# Altium footprint library LimeMicroAltiumLib.PcbLib: 876 footprints (part 25 of 57)
Each footprint in its own frame and in the unit in brackets; x right, y up, seen from the top. Pads: shape width x height; smd on the part's side, far side on the other; paste and mask are expansions set on the pad; w line width, h text height; cw(c..) or ccw(c..) is an arc to the next point about the centre after c.
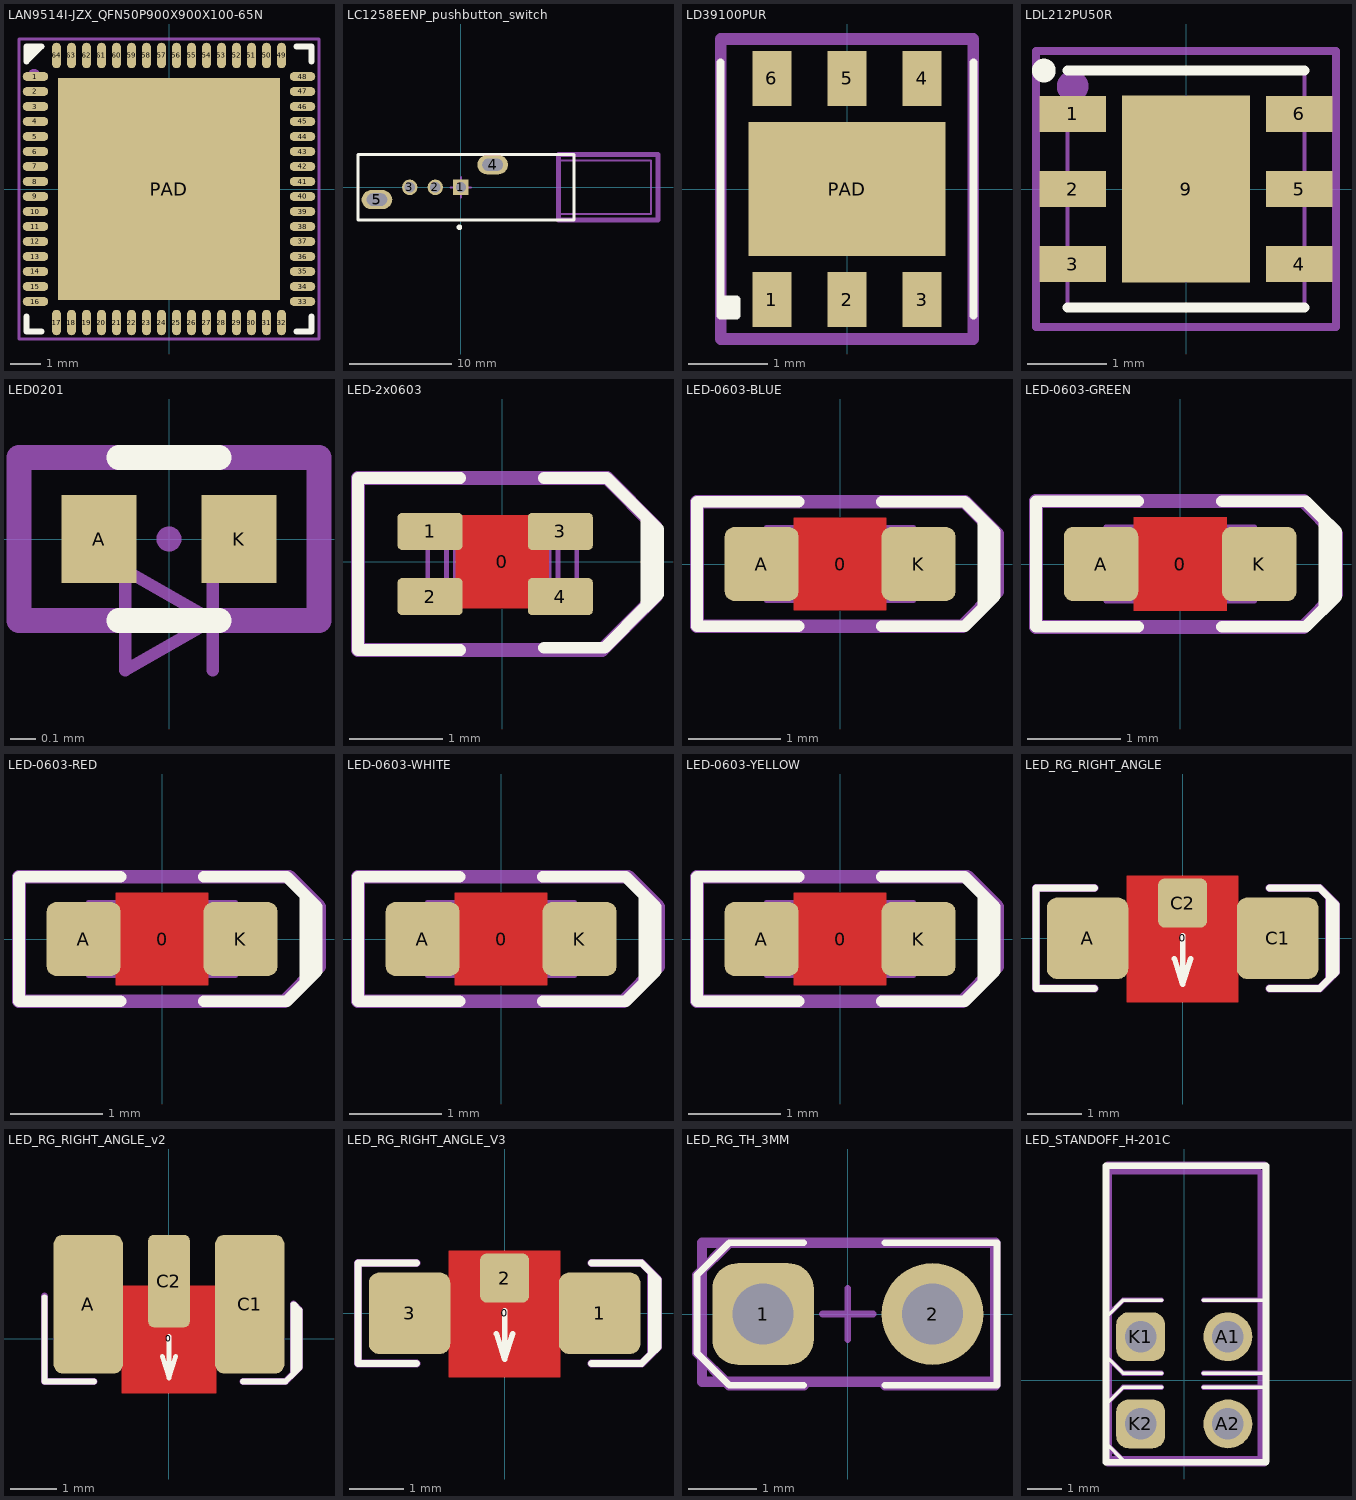
[diagram p24: the footprints below, top view; thin cyan lines are the x and y axes]

## LAN9514I-JZX_QFN50P900X900X100-65N [mm]
pads (65):
  oval 0.85x0.3 smd mask+0.05: 1(-4.45,3.75) 2(-4.45,3.25) 3(-4.45,2.75) 4(-4.45,2.25) 5(-4.45,1.75) 6(-4.45,1.25) 7(-4.45,0.75) 8(-4.45,0.25) 9(-4.45,-0.25) 10(-4.45,-0.75) 11(-4.45,-1.25) 12(-4.45,-1.75) 13(-4.45,-2.25) 14(-4.45,-2.75) 15(-4.45,-3.25) 16(-4.45,-3.75) 33(4.45,-3.75) 34(4.45,-3.25) 35(4.45,-2.75) 36(4.45,-2.25) 37(4.45,-1.75) 38(4.45,-1.25) 39(4.45,-0.75) 40(4.45,-0.25) 41(4.45,0.25) 42(4.45,0.75) 43(4.45,1.25) 44(4.45,1.75) 45(4.45,2.25) 46(4.45,2.75) 47(4.45,3.25) 48(4.45,3.75)
  oval 0.3x0.85 smd mask+0.05: 17(-3.75,-4.45) 18(-3.25,-4.45) 19(-2.75,-4.45) 20(-2.25,-4.45) 21(-1.75,-4.45) 22(-1.25,-4.45) 23(-0.75,-4.45) 24(-0.25,-4.45) 25(0.25,-4.45) 26(0.75,-4.45) 27(1.25,-4.45) 28(1.75,-4.45) 29(2.25,-4.45) 30(2.75,-4.45) 31(3.25,-4.45) 32(3.75,-4.45) 49(3.75,4.45) 50(3.25,4.45) 51(2.75,4.45) 52(2.25,4.45) 53(1.75,4.45) 54(1.25,4.45) 55(0.75,4.45) 56(0.25,4.45) 57(-0.25,4.45) 58(-0.75,4.45) 59(-1.25,4.45) 60(-1.75,4.45) 61(-2.25,4.45) 62(-2.75,4.45) 63(-3.25,4.45) 64(-3.75,4.45)
  rect 7.4x7.4 smd mask+0.05: PAD(0,0)
Top Overlay:
  region: -4.75,4.15 -4.15,4.75 -4.75,4.75
  lines w0.2: -4.75,-4.25 -4.75,-4.75 -4.25,-4.75 ; 4.25,-4.75 4.75,-4.75 4.75,-4.25 ; 4.25,4.75 4.75,4.75 4.75,4.25 ; -4.75,4.25 -4.25,4.75 -4.75,4.75 -4.75,4.25
Top Paste:
  region: -0.781,0.78 0.78,0.78 0.78,-0.781 -0.781,-0.781
  region: -3.123,0.78 -1.56,0.78 -1.56,-0.781 -3.123,-0.781
  region: 1.563,0.78 3.12,0.78 3.12,-0.781 1.563,-0.781
  region: 1.561,3.12 3.12,3.12 3.12,1.561 1.561,1.561
  region: -0.782,3.12 0.78,3.12 0.78,1.563 -0.782,1.563
  region: -3.124,3.12 -1.56,3.12 -1.56,1.562 -3.124,1.562
  region: -3.123,-1.56 -1.56,-1.56 -1.56,-3.123 -3.123,-3.123
  region: -0.782,-1.56 0.78,-1.56 0.78,-3.127 -0.782,-3.127
  region: 1.564,-1.56 3.12,-1.56 3.12,-3.127 1.564,-3.127
Mechanical 15:
  circle w0.2: c-4.5,3.8 r0.1
  lines w0.1: -5,-5 5,-5 5,5 -5,5 -5,-5
  lines w0.15: -0.9,0 0,0 ; 0,-0.9 0,0 ; 0,0.9 0,0 ; 0.9,0 0,0
  text ".Designator" at 0,0 h0.55
3D body "User Library-ZM7300G Series.step": height 0.9, standoff 0, extent -4.51,-4.51 4.51,4.51

## LC1258EENP_pushbutton_switch [mm]
pads (5):
  rect 1.5x1.5 hole 1 paste-1000 mask+0: 1(0,0)
  round 1.5 hole 1 paste-1000 mask+0: 2(-2.5,0) 3(-5,0)
  oval 3x1.85 hole 1.2 slot 2 at 0 deg paste-1000 mask+0: 4(3.1,2.2) 5(-8.2,-1.2)
Top Overlay:
  circle w0.3: c-0.15,-3.9 r0.125
  lines w0.3: -10.05,-3.2 11.05,-3.2 11.05,3.2 -10.05,3.2 -10.05,-3.2
Mechanical 15:
  lines w0.2: -1,0 0,0 ; 0,-1 0,0 ; 0,1 0,0 ; 1,0 0,0 ; 9.55,-3.2 -10.05,-3.2 -10.05,3.2 9.55,3.2 ; 9.65,-2.6 18.55,-2.6 18.55,2.6 9.65,2.6
  lines w0.5: 9.55,-3.2 9.55,3.2 19.25,3.2 19.25,-3.2 9.55,-3.2
  text "Switch plastic cap" at 11.55,-1.1 h0.55
  text "Switch" at 0.85,2.2 h0.55
  text ".Designator" at 0,0 h0.55
3D body "1RBLK.stp": height 7.54, standoff 2.46, extent 9.85,-2.53 18.85,2.53
3D body "Switch_E-Switch_LC1258EENP_eec.STEP": height 0.25, standoff 0, extent -9.225,-2.725 14.025,3.225

## LD39100PUR [mm]
pads (7):
  rect 0.5x0.7 smd mask+0.05: 1(-0.95,-1.4) 2(0,-1.4) 3(0.95,-1.4) 4(0.95,1.4) 5(0,1.4) 6(-0.95,1.4)
  rect 2.5x1.7 smd mask+0.05: PAD(0,0)
Top Overlay:
  region: -1.6,-1.4 -1.4,-1.4 -1.4,-1.6 -1.6,-1.6
  lines w0.1: -1.6,-1.4 -1.4,-1.4 -1.4,-1.6 -1.6,-1.6 -1.6,1.6 ; 1.6,-1.6 1.6,1.6
Mechanical 15:
  circle w0.2: c-0.9,-1.4 r0.025
  lines w0.15: -0.3,0 0.3,0 ; 0,-0.3 0,0.3 ; -1.6,-1.9 -1.6,1.9 1.6,1.9 1.6,-1 1.6,-1.9 -0.6,-1.9 -1.6,-1.9
  text ".Designator" at 0,0 h0.55
3D body "User Library-dfn6_3x3_rm0_95.step": height 0.8, standoff 0, extent -1.5,-1.55 1.5,1.55

## LDL212PU50R [mm]
pads (7):
  rect 0.84x0.45 smd mask+0.05: 1(-1.435,0.95) 2(-1.435,0) 3(-1.435,-0.95) 4(1.435,-0.95) 5(1.435,0) 6(1.435,0.95)
  rect 1.625x2.365 smd mask+0.05: 9(0,0)
Top Overlay:
  circle w0.2: c-1.8,1.5 r0.05
  lines w0.127: -1.5,-1.5 1.5,-1.5 ; -1.5,1.5 1.5,1.5
Top Paste:
  region: -0.57,0.83 0.57,0.83 0.57,-0.83 -0.57,-0.83
Mechanical 13:
  lines w0.05: -1.5,-1.5 1.5,-1.5 1.5,1.5 -1.5,1.5 -1.5,-1.5
Mechanical 15:
  circle w0.2: c-1.435,1.3 r0.1
  lines w0.1: -1.9,-1.75 -1.9,1.75 1.9,1.75 1.9,-1.75 -1.9,-1.75
  text ".Designator" at 0,0 h0.55
3D body "DFN-6-1EP_3x3mm_P0.95mm_EP1.7x2.6mm.step": height 0.87, standoff 0, extent -1.5,-1.49 1.5,1.49

## LED0201 [mm]
pads (2):
  rect 0.3x0.35 smd mask+0.05: A(-0.28,0) K(0.28,0)
Top Overlay:
  lines w0.1: -0.2,-0.325 0.2,-0.325 ; -0.2,0.325 0.2,0.325
Mechanical 15:
  circle w0.05: c0,0 r0.025
  lines w0.05: 0.175,-0.525 0.175,-0.125 ; -0.175,-0.525 0.175,-0.325 -0.175,-0.125 -0.175,-0.525
  lines w0.1: -0.6,-0.325 -0.6,0.325 0.6,0.325 0.6,-0.325 -0.6,-0.325
  text ".Designator" at 0.025,0 h0.55
3D body: height 0.2, standoff 0, extent -0.225,-0.5 -0.225,-0.5
3D body: height 0.2, standoff 0, extent -0.325,-0.175 0.325,0.175
3D body: height 0.1, standoff 0, extent -0.35,-0.175 -0.3,0.175
3D body: height 0.1, standoff 0, extent 0.3,-0.175 0.35,0.175

## LED-2x0603 [mm]
height 0.8
pads (5):
  round 0.254 on Mech15: 0(0,0)
  rrect25% 0.7x0.4 smd: 1(-0.775,0.325) 2(-0.775,-0.375) 3(0.625,0.325) 4(0.625,-0.375)
Top Layer:
  pour cut-out: -0.5,0.5 0.5,0.5 0.5,-0.5 -0.5,-0.5
Top Overlay:
  lines w0.127: -0.45,-0.95 -1.55,-0.95 -1.55,0.9 -0.45,0.9 ; 0.45,-0.925 1.1,-0.925 1.55,-0.475 1.55,0.475 1.125,0.9 0.45,0.9 ; 1.5,0.525 1.675,0.35 1.675,-0.35 1.525,-0.5
Mechanical 13:
  lines w0.05: -0.6,-0.4 -0.6,0.399 0.6,0.4 0.6,-0.4 -0.6,-0.399 ; -0.505,-0.398 -0.505,0.398 ; -0.5,-0.4 -0.8,-0.4 -0.8,0.4 -0.5,0.4 ; 0.5,-0.4 0.8,-0.4 0.8,0.4 0.5,0.4 ; 0.505,-0.398 0.505,0.398 ; -0.599,-0.398 -0.599,0.398 0.599,0.398 0.599,-0.398 -0.599,-0.398
Mechanical 15:
  lines w0.15: -1.55,-0.95 -1.55,0.9 1.125,0.9 1.65,0.375 1.65,-0.375 1.075,-0.95 -1.55,-0.95
  text ".Designator" at 0,0 h0.55
  text "C" at 0.6,-0.3 h0.55
  text "A" at -1.2,-0.3 h0.55
3D body "LED 0603 APT1608 GREEN.STEP": height 0.75, standoff 0, extent -0.8,-0.425 0.8,0.375
3D body: height 0.1, standoff 0, extent -0.1,-0.05 0.1,0.05

## LED-0603-BLUE [mm]
height 0.8
pads (3):
  round 0.254 on Mech15: 0(0,0)
  rrect25% 0.8x0.8 smd: A(-0.85,0) K(0.85,0)
Top Layer:
  pour cut-out: -0.5,0.5 0.5,0.5 0.5,-0.5 -0.5,-0.5
Top Overlay:
  lines w0.127: -0.45,-0.675 -1.55,-0.675 -1.55,0.675 -0.45,0.675 ; 0.45,-0.675 1.35,-0.675 1.55,-0.475 1.55,0.475 1.35,0.675 0.45,0.675 ; 1.5,0.525 1.675,0.35 1.675,-0.35 1.525,-0.5
Mechanical 13:
  lines w0.05: -0.6,-0.4 -0.6,0.399 0.6,0.4 0.6,-0.4 -0.6,-0.399 ; -0.505,-0.398 -0.505,0.398 ; -0.5,-0.4 -0.8,-0.4 -0.8,0.4 -0.5,0.4 ; 0.5,-0.4 0.8,-0.4 0.8,0.4 0.5,0.4 ; 0.505,-0.398 0.505,0.398 ; -0.599,-0.398 0.599,-0.398 0.599,0.398 -0.599,0.398 -0.599,-0.398
Mechanical 15:
  lines w0.15: -1.55,-0.675 -1.55,0.675 1.35,0.675 1.7,0.325 1.7,-0.3 1.325,-0.675 -1.55,-0.675
  text ".Designator" at 0,0 h0.55
  text "A" at -1.2,-0.3 h0.55
  text "C" at 0.6,-0.3 h0.55
3D body "LED 0603 APT1608 BLUE.STEP": height 0.75, standoff 0, extent -0.8,-0.4 0.8,0.4

## LED-0603-GREEN [mm]
height 0.8
pads (3):
  round 0.254 on Mech15: 0(0,0)
  rrect25% 0.8x0.8 smd: A(-0.85,0) K(0.85,0)
Top Layer:
  pour cut-out: -0.5,0.5 0.5,0.5 0.5,-0.5 -0.5,-0.5
Top Overlay:
  lines w0.127: -0.45,-0.675 -1.55,-0.675 -1.55,0.675 -0.45,0.675 ; 0.45,-0.675 1.35,-0.675 1.55,-0.475 1.55,0.475 1.35,0.675 0.45,0.675 ; 1.5,0.525 1.675,0.35 1.675,-0.35 1.525,-0.5
Mechanical 13:
  lines w0.05: -0.6,-0.4 -0.6,0.399 0.6,0.4 0.6,-0.4 -0.6,-0.399 ; -0.505,-0.398 -0.505,0.398 ; -0.5,-0.4 -0.8,-0.4 -0.8,0.4 -0.5,0.4 ; 0.5,-0.4 0.8,-0.4 0.8,0.4 0.5,0.4 ; 0.505,-0.398 0.505,0.398 ; -0.599,-0.398 -0.599,0.398 0.599,0.398 0.599,-0.398 -0.599,-0.398
Mechanical 15:
  lines w0.15: -1.55,-0.675 -1.55,0.675 1.325,0.675 1.675,0.325 1.675,-0.325 1.325,-0.675 -1.55,-0.675
  text ".Designator" at 0,0 h0.55
  text "C" at 0.6,-0.3 h0.55
  text "A" at -1.2,-0.3 h0.55
3D body "LED 0603 APT1608 GREEN.STEP": height 0.75, standoff 0, extent -0.8,-0.4 0.8,0.4

## LED-0603-RED [mm]
height 0.8
pads (3):
  round 0.254 on Mech15: 0(0,0)
  rrect25% 0.8x0.8 smd: A(-0.85,0) K(0.85,0)
Top Layer:
  pour cut-out: -0.5,0.5 0.5,0.5 0.5,-0.5 -0.5,-0.5
Top Overlay:
  lines w0.127: -0.45,-0.675 -1.55,-0.675 -1.55,0.675 -0.45,0.675 ; 0.45,-0.675 1.35,-0.675 1.55,-0.475 1.55,0.475 1.35,0.675 0.45,0.675 ; 1.5,0.525 1.675,0.35 1.675,-0.35 1.525,-0.5
Mechanical 13:
  lines w0.05: -0.6,-0.4 -0.6,0.399 0.6,0.4 0.6,-0.4 -0.6,-0.399 ; -0.505,-0.398 -0.505,0.398 ; -0.5,-0.4 -0.8,-0.4 -0.8,0.4 -0.5,0.4 ; 0.5,-0.4 0.8,-0.4 0.8,0.4 0.5,0.4 ; 0.505,-0.398 0.505,0.398 ; -0.599,-0.398 0.599,-0.398 0.599,0.398 -0.599,0.398 -0.599,-0.398
Mechanical 15:
  lines w0.15: -1.55,-0.675 -1.55,0.675 1.375,0.675 1.7,0.35 1.7,-0.3 1.325,-0.675 -1.55,-0.675
  text ".Designator" at 0,0 h0.55
  text "C" at 0.6,-0.3 h0.55
  text "A" at -1.2,-0.3 h0.55
3D body "LED 0603 APT1608 RED.STEP": height 0.75, standoff 0, extent -0.8,-0.4 0.8,0.4

## LED-0603-WHITE [mm]
height 0.8
pads (3):
  round 0.254 on Mech15: 0(0,0)
  rrect25% 0.8x0.8 smd: A(-0.85,0) K(0.85,0)
Top Layer:
  pour cut-out: -0.5,0.5 0.5,0.5 0.5,-0.5 -0.5,-0.5
Top Overlay:
  lines w0.127: -0.45,-0.675 -1.55,-0.675 -1.55,0.675 -0.45,0.675 ; 0.45,-0.675 1.35,-0.675 1.55,-0.475 1.55,0.475 1.35,0.675 0.45,0.675 ; 1.5,0.525 1.675,0.35 1.675,-0.35 1.525,-0.5
Mechanical 13:
  lines w0.05: -0.6,-0.4 -0.6,0.399 0.6,0.4 0.6,-0.4 -0.6,-0.399 ; -0.505,-0.398 -0.505,0.398 ; -0.5,-0.4 -0.8,-0.4 -0.8,0.4 -0.5,0.4 ; 0.5,-0.4 0.8,-0.4 0.8,0.4 0.5,0.4 ; 0.505,-0.398 0.505,0.398 ; -0.599,-0.398 0.599,-0.398 0.599,0.398 -0.599,0.398 -0.599,-0.398
Mechanical 15:
  lines w0.15: -1.55,-0.675 1.325,-0.675 1.7,-0.3 1.7,0.35 1.375,0.675 -1.55,0.675 -1.55,-0.675
  text ".Designator" at 0,0 h0.55
  text "A" at -1.2,-0.3 h0.55
  text "C" at 0.6,-0.3 h0.55
3D body "LED 0603 APT1608 WHITE.STEP": height 0.75, standoff 0, extent -0.8,-0.4 0.8,0.4

## LED-0603-YELLOW [mm]
height 0.8
pads (3):
  round 0.254 on Mech15: 0(0,0)
  rrect25% 0.8x0.8 smd: A(-0.85,0) K(0.85,0)
Top Layer:
  pour cut-out: -0.5,0.5 0.5,0.5 0.5,-0.5 -0.5,-0.5
Top Overlay:
  lines w0.127: -0.45,-0.675 -1.55,-0.675 -1.55,0.675 -0.45,0.675 ; 0.45,-0.675 1.35,-0.675 1.55,-0.475 1.55,0.475 1.35,0.675 0.45,0.675 ; 1.5,0.525 1.675,0.35 1.675,-0.35 1.525,-0.5
Mechanical 13:
  lines w0.05: -0.6,-0.4 -0.6,0.399 0.6,0.4 0.6,-0.4 -0.6,-0.399 ; -0.505,-0.398 -0.505,0.398 ; -0.5,-0.4 -0.8,-0.4 -0.8,0.4 -0.5,0.4 ; 0.5,-0.4 0.8,-0.4 0.8,0.4 0.5,0.4 ; 0.505,-0.398 0.505,0.398 ; -0.599,-0.398 0.599,-0.398 0.599,0.398 -0.599,0.398 -0.599,-0.398
Mechanical 15:
  lines w0.15: -1.55,-0.675 1.325,-0.675 1.7,-0.3 1.7,0.35 1.375,0.675 -1.55,0.675 -1.55,-0.675
  text ".Designator" at 0,0 h0.55
  text "A" at -1.2,-0.3 h0.55
  text "C" at 0.6,-0.3 h0.55
3D body "LED 0603 APT1608 YELLOW.STEP": height 0.75, standoff 0, extent -0.8,-0.4 0.8,0.4

## LED_RG_RIGHT_ANGLE [mm] "LTST-S326KGJRKT"
height 1
pads (4):
  round 0.254 on Mech15: 0(0,0)
  rrect25% 1.5x1.5 smd: A(-1.75,0) C1(1.75,0)
  rrect25% 0.9x0.9 smd: C2(0,0.65)
Top Layer:
  pour cut-out: -1.025,1.15 1.025,1.15 1.025,-1.175 -1.025,-1.175
Top Overlay:
  lines w0.1: -0.15,-0.375 0,-0.85 ; 0,0.05 0,-0.85 ; 0.15,-0.375 0,-0.85
  lines w0.127: -2.7,0.9 -2.7,-0.925 -1.625,-0.925 ; -2.7,0.925 -1.625,0.925 ; 1.6,-0.925 2.35,-0.925 ; 1.6,0.925 2.35,0.925 ; 2.325,-0.925 2.525,-0.925 2.7,-0.75 ; 2.325,0.925 2.525,0.925 2.7,0.75 ; 2.7,-0.75 2.7,0.75 ; 2.7,-0.75 2.825,-0.625 2.825,0.625 2.7,0.75
Mechanical 15:
  lines w0.05: -1.5,-0.037 -1.25,-0.037 ; -0.525,-0.625 -0.525,-0.175 ; -0.525,0.1 -0.525,0.55 ; -0.25,0.325 -1.25,0.325 -1.25,-0.4 1.125,-0.4 ; -0.925,-0.625 -0.925,-0.175 -0.525,-0.4 -0.925,-0.625 ; -0.925,0.1 -0.525,0.325 -0.925,0.55 -0.925,0.1
  lines w0.15: -1.625,-0.925 -2.7,-0.925 -2.7,0.925 -1.625,0.925 ; 1.6,-0.925 2.35,-0.925 ; 1.6,0.925 2.35,0.925 ; 2.325,-0.925 2.525,-0.925 2.7,-0.75 ; 2.325,0.925 2.525,0.925 2.7,0.75 ; 2.7,-0.75 2.825,-0.625 2.825,0.625 2.7,0.75 ; 2.7,-0.75 2.7,0.75
  text ".Designator" at -0.04,0.025 h0.55
  text "A" at -1.95,-0.2 h0.55
  text "C1" at 1.45,-0.3 h0.55
3D body: height 0.99, standoff 0, extent -1.04,-1.475 0.96,0.525
3D body: height 1, standoff 0, extent -1.54,-0.475 1.46,0.525

## LED_RG_RIGHT_ANGLE_v2 [mm] "LTST-S326KGJRKT"
height 1
pads (4):
  round 0.254 on Mech15: 0(0,0)
  rrect25% 1.5x3 smd: A(-1.75,0.75) C1(1.75,0.75)
  rrect25% 0.9x2 smd: C2(0,1.25)
Top Layer:
  pour cut-out: -1.025,1.15 1.025,1.15 1.025,-1.175 -1.025,-1.175
Top Overlay:
  lines w0.1: -0.15,-0.375 0,-0.85 ; 0,0.05 0,-0.85 ; 0.15,-0.375 0,-0.85
  lines w0.127: -2.7,0.9 -2.7,-0.925 -1.625,-0.925 ; 1.6,-0.925 2.35,-0.925 ; 2.325,-0.925 2.525,-0.925 2.7,-0.75 ; 2.7,-0.75 2.7,0.75 2.825,0.625 2.825,-0.625 2.7,-0.75
Mechanical 15:
  lines w0.05: -1.5,-0.037 -1.25,-0.037 ; -0.525,-0.625 -0.525,-0.175 ; -0.525,0.1 -0.525,0.55 ; -0.25,0.325 -1.25,0.325 -1.25,-0.4 1.125,-0.4 ; -0.925,-0.625 -0.925,-0.175 -0.525,-0.4 -0.925,-0.625 ; -0.925,0.1 -0.525,0.325 -0.925,0.55 -0.925,0.1
  lines w0.15: -2.7,0.925 -2.7,-0.925 -1.625,-0.925 ; 1.6,-0.925 2.35,-0.925 ; 2.325,-0.925 2.525,-0.925 2.7,-0.75 ; 2.7,-0.75 2.825,-0.625 2.825,0.625 2.7,0.75 2.7,-0.75
  text ".Designator" at -0.04,0.025 h0.55
  text "A" at -1.95,-0.275 h0.55
  text "C1" at 1.45,-0.3 h0.55
3D body: height 0.99, standoff 0, extent -1.04,-1.475 0.96,0.525
3D body: height 1, standoff 0, extent -1.54,-0.475 1.46,0.525

## LED_RG_RIGHT_ANGLE_V3 [mm] "LTST-S326KGJRKT"
height 1
pads (4):
  round 0.254 on Mech15: 0(0,0)
  rrect25% 1.5x1.5 smd: 1(1.75,0) 3(-1.75,0)
  rrect25% 0.9x0.9 smd: 2(0,0.65)
Top Layer:
  pour cut-out: -1.025,1.15 1.025,1.15 1.025,-1.175 -1.025,-1.175
Top Overlay:
  lines w0.1: -0.15,-0.375 0,-0.85 ; 0,0.05 0,-0.85 ; 0.15,-0.375 0,-0.85
  lines w0.127: -2.7,0.9 -2.7,-0.925 -1.625,-0.925 ; -2.7,0.925 -1.625,0.925 ; 1.6,-0.925 2.35,-0.925 ; 1.6,0.925 2.35,0.925 ; 2.325,-0.925 2.525,-0.925 2.7,-0.75 ; 2.325,0.925 2.525,0.925 2.7,0.75 ; 2.7,-0.75 2.7,0.75 ; 2.7,-0.75 2.825,-0.625 2.825,0.625 2.7,0.75
Mechanical 15:
  lines w0.05: -1.5,-0.037 -1.25,-0.037 ; -0.525,-0.625 -0.525,-0.175 ; -0.525,0.1 -0.525,0.55 ; -0.25,0.325 -1.25,0.325 -1.25,-0.4 1.125,-0.4 ; -0.925,-0.625 -0.525,-0.4 -0.925,-0.175 -0.925,-0.625 ; -0.925,0.1 -0.925,0.55 -0.525,0.325 -0.925,0.1
  lines w0.15: -1.625,-0.925 -2.7,-0.925 -2.7,0.925 -1.625,0.925 ; 1.6,-0.925 2.35,-0.925 ; 1.6,0.925 2.35,0.925 ; 2.325,-0.925 2.525,-0.925 2.7,-0.75 ; 2.325,0.925 2.525,0.925 2.7,0.75 ; 2.7,-0.75 2.825,-0.625 2.825,0.625 2.7,0.75 ; 2.7,-0.75 2.7,0.75
  text ".Designator" at -0.04,0.025 h0.55
  text "A" at -2.05,-0.15 h0.55
  text "C1" at -0.4,0.6 h0.55
  text "C2" at 1.525,-0.175 h0.55
3D body: height 0.99, standoff 0, extent -1.04,-1.475 0.96,0.525
3D body: height 1, standoff 0, extent -1.54,-0.475 1.46,0.525

## LED_RG_TH_3MM [mm] "Bivar Inc. 4301F1/5-A red green throughole LED"
pads (2):
  rrect50% 1.5x1.5 hole 0.9: 1(-1.25,0)
  round 1.5 hole 0.9: 2(1.25,0)
Top Overlay:
  lines w0.1: -0.65,-1.05 -1.75,-1.05 -2.225,-0.575 -2.225,0.125 -2.225,0.575 -1.75,1.05 -0.65,1.05 ; 0.55,-1.05 2.2,-1.05 2.2,1.05 0.55,1.05
Mechanical 13:
  lines w0.15: -2.15,-1 2.175,-1 2.175,1.05 -2.15,1.05 -2.15,-1
Mechanical 15:
  lines w0.1: -0.375,0 0,0 ; 0,-0.375 0,0 ; 0,0.375 0,0 ; 0.375,0 0,0
  lines w0.15: -0.65,-1.05 -1.75,-1.05 -2.225,-0.575 -2.225,0.125 -2.225,0.575 -1.75,1.05 -0.65,1.05 ; 0.55,-1.05 2.15,-1.05 2.175,-1.05 2.175,1.05 0.55,1.05
  text "1" at -1.4,-0.25 h0.55
  text "2" at 1.1,-0.25 h0.55
  text ".Designator" at 0,-0.05 h0.55

## LED_STANDOFF_H-201C [mm] "Bivar Inc. H-201C"
pads (4):
  round 1.4 hole 0.9: A1(1.25,1.25) A2(1.25,-1.25)
  rrect50% 1.4x1.4 hole 0.9: K1(-1.25,1.25) K2(-1.25,-1.25)
Top Overlay:
  lines w0.1: -0.65,-2.3 -1.75,-2.3 -2.225,-1.825 -2.225,-1.125 -2.225,-0.675 -1.75,-0.2 -0.65,-0.2 ; -0.65,0.2 -1.75,0.2 -2.225,0.675 -2.225,1.375 -2.225,1.825 -1.75,2.3 -0.65,2.3 ; 0.55,-2.3 2.15,-2.3 ; 0.55,-0.2 2.3,-0.2 ; 0.55,0.2 2.3,0.2 ; 0.55,2.3 2.3,2.3
  lines w0.2: -2.25,-2.35 -2.25,1.25 -2.25,6.15 2.35,6.15 2.35,1.25 2.35,-2.325 2.325,-2.35 -2.25,-2.35
Mechanical 13:
  lines w0.15: -2.15,-2.25 -2.15,5.975 2.175,5.975 2.175,-2.25 -2.15,-2.25
Mechanical 15:
  lines w0.15: -0.65,-2.3 -1.75,-2.3 -2.225,-1.825 -2.225,-1.125 -2.225,-0.675 -1.75,-0.2 -0.65,-0.2 ; -0.65,0.2 -1.75,0.2 -2.225,0.675 -2.225,1.375 -2.225,1.825 -1.75,2.3 -0.65,2.3 ; 0.55,-2.3 2.15,-2.3 ; 0.55,-0.2 2.175,-0.2 ; 0.55,0.2 2.15,0.2 ; 0.55,2.3 2.175,2.3 ; -2.2,-2.4 -2.2,6.2 2.3,6.2 2.3,2.1 2.3,-2.4 -2.2,-2.4
  text ".Designator" at 0,0 h0.55
  text "A" at 1,-1.5 h0.55
  text "C" at -1.4,-1.6 h0.55
  text "A" at 1,1 h0.55
  text "C" at -1.5,0.9 h0.55
  text "PCB edge" at -1.8,5.5 h0.5
3D body "3mm_LED_holder_x2.STEP": height 9.7, standoff -2.6, extent -2.225,-1.925 2.375,9.175